# EAGLE library part Conn_2x04_2.00mm_Socket (library JR)
2 x 4 socket (female), 2.00 mm pitch, through-hole
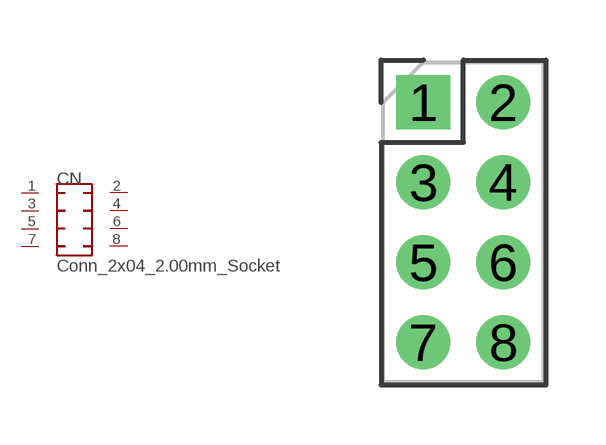
[diagram p4: symbol with the pads of PinHeader_2x04_P2.00mm_Vertical; footprint PinHeader_2x04_P2.00mm_Vertical]

Designator prefix CN

## Conn_2x04_2.00mm_Socket (DESCRIPTION: 2 x 4 socket (female), 2.00 mm pitch, through-hole; MPN: 2.0 mm 2x4 female header THT)  [PinHeader_2x04_P2.00mm_Vertical]
1  1  pas
2  2  pas
3  3  pas
4  4  pas
5  5  pas
6  6  pas
7  7  pas
8  8  pas

## Footprint PinHeader_2x04_P2.00mm_Vertical (pad centres in mm)
Through hole straight pin header, 2x04, 2.00mm pitch, double rows
drill 0.8 pad 1.35 square: 1 0,0
drill 0.8 pad 1.35 round: 2 2,0; 3 0,-2; 4 2,-2; 5 0,-4; 6 2,-4; 7 0,-6; 8 2,-6